# Altium footprint library PcbLib1.PcbLib: 13 footprints
Each footprint in its own frame and in the unit in brackets; x right, y up, seen from the top. Pads: shape width x height; smd on the part's side, far side on the other; paste and mask are expansions set on the pad; w line width, h text height; cw(c..) or ccw(c..) is an arc to the next point about the centre after c.
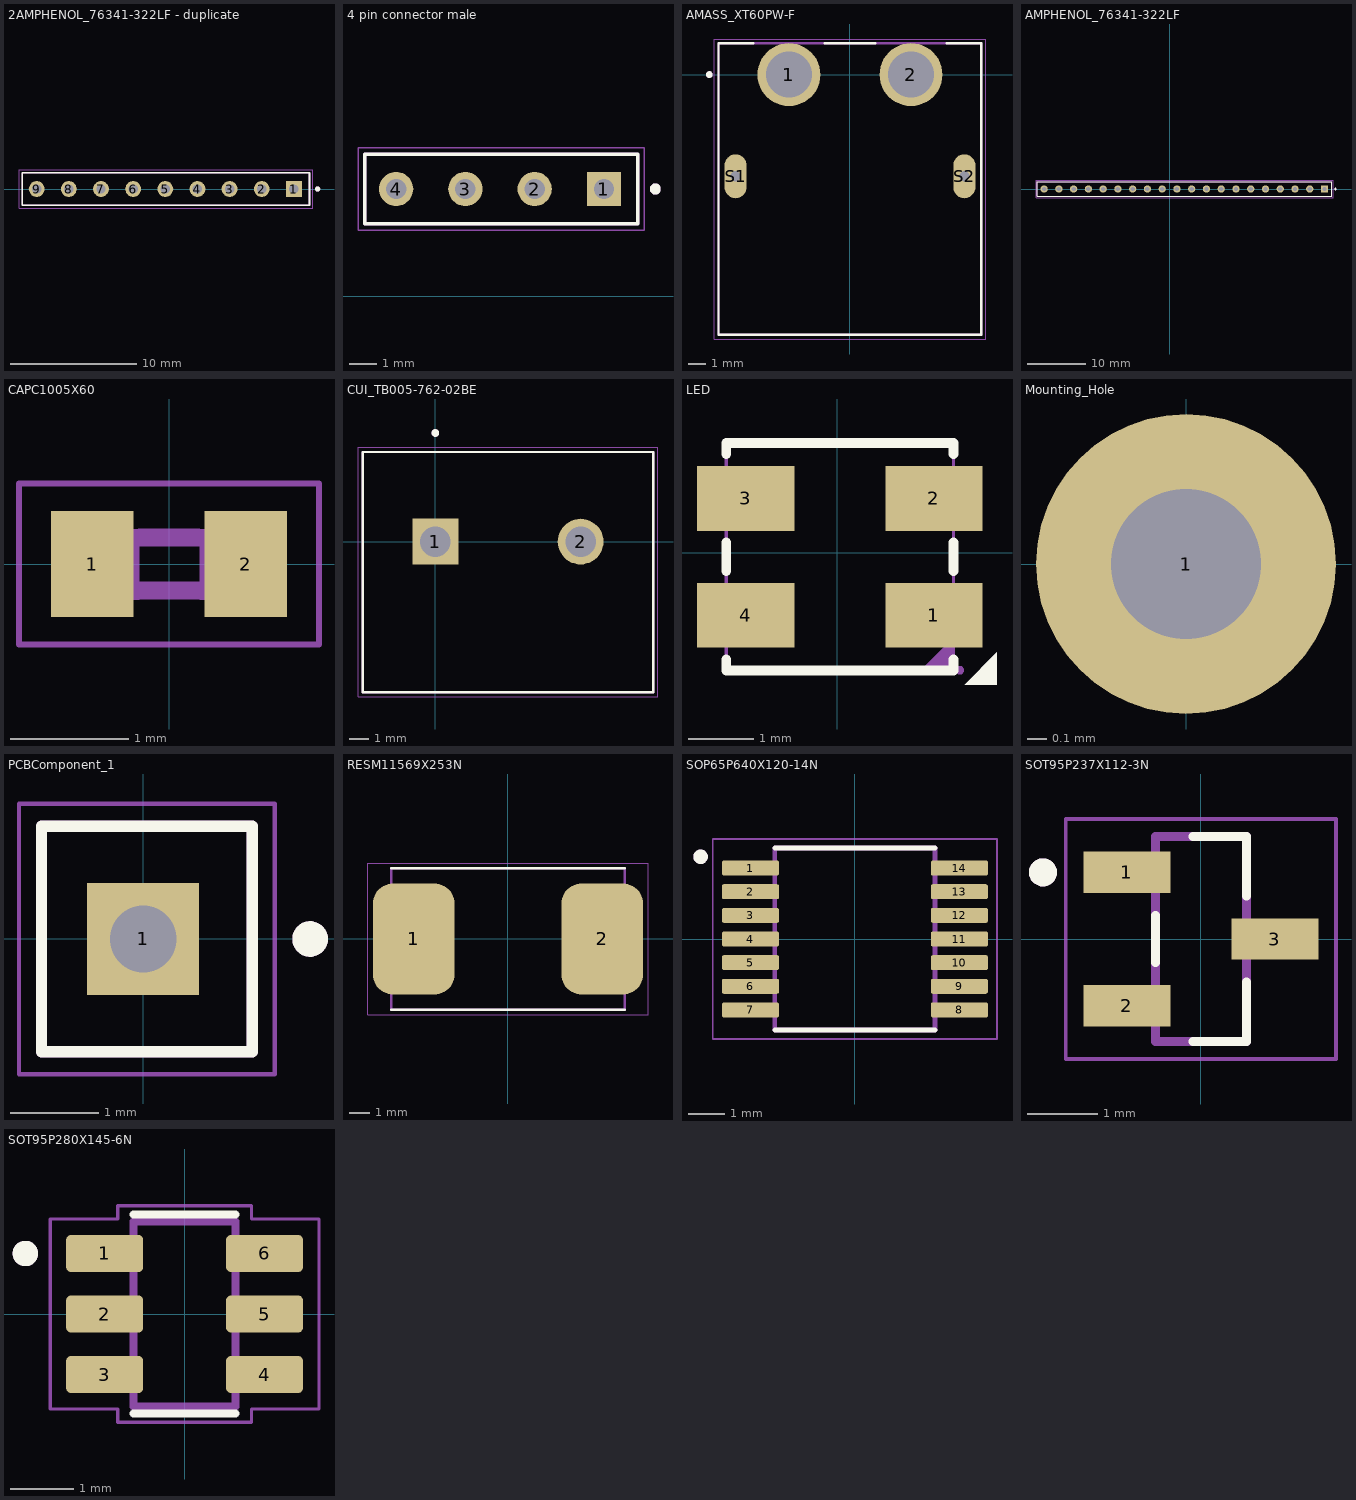
[diagram p0: the footprints below, top view; thin cyan lines are the x and y axes]

## 2AMPHENOL_76341-322LF - duplicate [mm]
pads (9):
  rect 1.258x1.258 / inner round 1.258 / far side rect 1.258x1.258 hole 0.75: 1(26.67,0)
  round 1.258 hole 0.75: 2(24.13,0) 3(21.59,0) 4(19.05,0) 5(16.51,0) 6(13.97,0) 7(11.43,0) 8(8.89,0) 9(6.35,0)
Top Overlay:
  circle w0.2: c28.55,0 r0.1
  lines w0.127: 5.207,-1.27 27.9,-1.27 27.9,1.27 5.207,1.27 5.207,-1.27
Mechanical 13:
  circle w0.2: c28.55,0 r0.1
  lines w0.127: 5.207,-1.27 27.9,-1.27 ; 5.207,-1.27 27.9,-1.27 ; 5.207,-1.27 5.207,1.27 27.9,1.27 27.9,-1.27
Mechanical 15:
  lines w0.05: 4.953,-1.52 4.953,1.52 28.15,1.52 28.15,-1.52 4.953,-1.52

## 4 pin connector male [mm]
pads (4):
  rect 1.258x1.258 / inner round 1.258 / far side rect 1.258x1.258 hole 0.75: 1(22.86,3.937)
  round 1.258 hole 0.75: 2(20.32,3.937) 3(17.78,3.937) 4(15.24,3.937)
Top Overlay:
  circle w0.2: c24.74,3.937 r0.1
  lines w0.127: 14.097,2.667 24.09,2.667 24.09,5.207 14.097,5.207 14.097,2.667
Mechanical 13:
  circle w0.2: c24.74,3.937 r0.1
  lines w0.127: 14.224,2.667 24.09,2.667 ; 24.09,2.667 24.09,5.207 14.097,5.207 14.097,2.667 24.09,2.667
Mechanical 15:
  lines w0.05: 13.843,2.417 24.34,2.417 24.34,5.457 13.843,5.457 13.843,2.417

## AMASS_XT60PW-F [mm]
height 8.4
pads (4):
  round 3.716 hole 2.7: 1(-3.6,0) 2(3.6,0)
  oval 1.3x2.6 hole 0.6 square: S1(-6.75,-6) S2(6.75,-6)
Top Overlay:
  circle w0.2: c-8.3,0 r0.1
  lines w0.127: -5.71,1.85 -7.75,1.85 -7.75,-15.35 7.75,-15.35 7.75,1.85 5.71,1.85 ; -1.49,1.85 1.49,1.85
Mechanical 13:
  circle w0.2: c-8.3,0 r0.1
  lines w0.127: -7.75,-15.35 7.75,-15.35 7.75,1.85 -7.75,1.85 -7.75,-15.35
Mechanical 15:
  lines w0.05: -8,-15.6 8,-15.6 8,2.1 -8,2.1 -8,-15.6
3D body "step_temp.STEP": height 8.4, standoff -2.55, extent -7.75,-15.35 7.75,1.85

## AMPHENOL_76341-322LF [mm]
pads (20):
  rect 1.258x1.258 / inner round 1.258 / far side rect 1.258x1.258 hole 0.75: 01(26.67,0)
  round 1.258 hole 0.75: 02(24.13,0) 03(21.59,0) 04(19.05,0) 05(16.51,0) 06(13.97,0) 07(11.43,0) 08(8.89,0) 09(6.35,0) 10(3.81,0) 11(1.27,0) 12(-1.27,0) 13(-3.81,0) 14(-6.35,0) 15(-8.89,0) 16(-11.43,0) 17(-13.97,0) 18(-16.51,0) 19(-19.05,0) 20(-21.59,0)
Top Overlay:
  circle w0.2: c28.55,0 r0.1
  lines w0.127: -22.733,-1.27 27.9,-1.27 27.9,1.27 -22.733,1.27 -22.733,-1.27
Mechanical 13:
  circle w0.2: c28.55,0 r0.1
  lines w0.127: -22.733,-1.27 27.9,-1.27 ; -22.733,-1.27 27.9,-1.27 ; -22.733,-1.27 -22.733,1.27 27.9,1.27 27.9,-1.27
Mechanical 15:
  lines w0.05: -22.987,-1.52 -22.987,1.52 28.15,1.52 28.15,-1.52 -22.987,-1.52

## CAPC1005X60 [mm]
pads (2):
  rect 0.7x0.9 smd: 1(-0.65,0) 2(0.65,0)
Mechanical 13:
  region: -0.254,-0.305 -0.555,-0.305 -0.555,0.295 -0.254,0.295
  region: 0.559,-0.305 0.259,-0.305 0.259,0.295 0.559,0.295
  lines w0.152: -0.245,-0.224 0.245,-0.224 ; -0.245,0.224 0.245,0.224
Mechanical 15:
  lines w0.051: -1.273,-0.683 1.273,-0.683 1.273,0.683 -1.273,0.683 -1.273,-0.683
3D body "step_temp.STEP": height 0.4, standoff 0, extent -0.5,-0.25 0.5,0.25

## CUI_TB005-762-02BE [mm]
pads (2):
  rect 2.4x2.4 / inner round 2.4 / far side rect 2.4x2.4 hole 1.6: 1(0,0)
  round 2.4 hole 1.6: 2(7.62,0)
Top Overlay:
  circle w0.2: c0,5.7 r0.1
  lines w0.127: -3.81,-7.9 11.43,-7.9 11.43,4.7 -3.81,4.7 -3.81,-7.9
Mechanical 13:
  circle w0.2: c0,5.7 r0.1
  lines w0.127: -3.81,-7.9 11.43,-7.9 11.43,4.7 -3.81,4.7 -3.81,-7.9
Mechanical 15:
  lines w0.05: -4.06,-8.15 -4.06,4.95 11.68,4.95 11.68,-8.15 -4.06,-8.15
3D body "step_temp.STEP": height 21.7, standoff -4.75, extent -4.318,-7.697 11.522,4.903

## LED [mm]
pads (4):
  rect 1.5x1 smd: 1(1.491,-0.96) 2(1.491,0.841) 3(-1.409,0.841) 4(-1.409,-0.96)
Top Overlay:
  region: 1.963,-2.032 2.463,-2.032 2.463,-1.532
  lines w0.152: -1.709,-1.64 -1.709,-1.809 1.791,-1.809 1.791,-1.64 ; -1.709,-0.279 -1.709,0.16 ; -1.709,1.521 -1.709,1.691 1.791,1.691 1.791,1.521 ; 1.791,-0.279 1.791,0.16
Mechanical 6:
  drawing of 21 lines, arcs and shapes, not listed
Mechanical 15:
  region: 1.951,-1.809 1.951,-1.834 1.916,-1.869 1.866,-1.869 1.831,-1.834 1.831,-1.809 1.831,-1.785 1.866,-1.749 1.916,-1.749 1.951,-1.785
  region: -0.909,0.441 -1.809,0.441 -1.809,1.241 -0.909,1.241
  region: -0.909,-1.36 -1.809,-1.36 -1.809,-0.56 -0.909,-0.56
  region: 1.891,0.441 0.991,0.441 0.991,1.241 1.891,1.241
  region: 1.891,-1.36 0.991,-1.36 0.991,-0.56 1.891,-0.56
  lines w0.051: -1.709,-1.809 -1.709,1.691 1.791,1.691 1.791,-1.809 -1.709,-1.809
3D body "SMD3535 RGB.stp": height 1, standoff 0, extent -1.723,-1.801 1.977,1.699

## Mounting_Hole [mil]
pads (1):
  round 60 hole 30: 1(0,0)

## PCBComponent_1 [mm]
pads (1):
  rect 1.258x1.258 / inner round 1.258 / far side rect 1.258x1.258 hole 0.75: 1(0,0)
Top Overlay:
  circle w0.2: c1.88,0 r0.1
  lines w0.127: -1.143,-1.27 1.23,-1.27 1.23,1.27 -1.143,1.27 -1.143,-1.27
Mechanical 13:
  circle w0.2: c1.88,0 r0.1
  lines w0.127: -1.143,-1.27 1.23,-1.27 ; -1.143,-1.27 1.23,-1.27 ; -1.143,-1.27 -1.143,1.27 1.23,1.27 1.23,-1.27
Mechanical 15:
  lines w0.05: -1.397,-1.52 -1.397,1.52 1.48,1.52 1.48,-1.52 -1.397,-1.52

## RESM11569X253N [mm]
pads (2):
  rrect50% 4.04x5.51 smd: 1(-4.665,0) 2(4.665,0)
Top Overlay:
  lines w0.127: -5.78,-3.49 5.78,-3.49 ; -5.78,3.49 5.78,3.49
Mechanical 13:
  lines w0.127: -5.78,-3.49 -5.78,3.49 5.78,3.49 5.78,-3.49 -5.78,-3.49
Mechanical 15:
  lines w0.05: -6.935,-3.74 -6.935,3.74 6.935,3.74 6.935,-3.74 -6.935,-3.74
3D body "WSR 2.STEP": height 2.42, standoff 0.01, extent -5.78,-3.556 5.78,3.424

## SOP65P640X120-14N [mm]
pads (14):
  rrect25% 1.57x0.41 smd: 1(-2.87,1.95) 2(-2.87,1.3) 3(-2.87,0.65) 4(-2.87,0) 5(-2.87,-0.65) 6(-2.87,-1.3) 7(-2.87,-1.95) 8(2.87,-1.95) 9(2.87,-1.3) 10(2.87,-0.65) 11(2.87,0) 12(2.87,0.65) 13(2.87,1.3) 14(2.87,1.95)
Top Overlay:
  circle w0.2: c-4.24,2.26 r0.1
  lines w0.127: -2.2,-2.5 2.2,-2.5 ; -2.2,2.5 2.2,2.5
Mechanical 13:
  circle w0.2: c-4.24,2.26 r0.1
  lines w0.127: -2.2,-2.5 -2.2,2.5 2.2,2.5 2.2,-2.5 -2.2,-2.5
Mechanical 15:
  lines w0.05: -3.905,-2.75 -3.905,2.75 3.905,2.75 3.905,-2.75 -3.905,-2.75
3D body "step_temp.STEP": height 1.2, standoff 0, extent -3.2,-2.5 3.2,2.5

## SOT95P237X112-3N [mm]
height 1.12
pads (3):
  rect 1.24x0.59 smd: 1(-1.055,0.95) 2(-1.055,-0.95) 3(1.055,0)
Top Overlay:
  circle w0.2: c-2.25,0.95 r0.1
  lines w0.127: -0.65,-0.335 -0.65,0.335 ; -0.115,-1.46 0.65,-1.46 0.65,-0.615 ; -0.115,1.46 0.65,1.46 0.65,0.615
Mechanical 13:
  circle w0.2: c-2.25,0.95 r0.1
  lines w0.127: -0.65,-1.46 0.65,-1.46 0.65,1.46 -0.65,1.46 -0.65,-1.46
Mechanical 15:
  lines w0.05: -1.925,-1.71 1.925,-1.71 1.925,1.71 -1.925,1.71 -1.925,-1.71
3D body "step_temp.STEP": height 1.12, standoff 0, extent -1.185,-1.46 1.185,1.46

## SOT95P280X145-6N [mm]
pads (6):
  rrect25% 1.21x0.58 smd: 1(-1.255,0.95) 2(-1.255,0) 3(-1.255,-0.95) 4(1.255,-0.95) 5(1.255,0) 6(1.255,0.95)
Top Overlay:
  circle w0.2: c-2.5,0.95 r0.1
  lines w0.127: -0.8,-1.56 0.8,-1.56 ; -0.8,1.56 0.8,1.56
Mechanical 13:
  circle w0.2: c-2.5,0.95 r0.1
  lines w0.127: -0.8,-1.45 -0.8,1.45 0.8,1.45 0.8,-1.45 -0.8,-1.45
Mechanical 15:
  lines w0.05: -2.11,-1.49 -2.11,1.49 -1.05,1.49 -1.05,1.7 1.05,1.7 1.05,1.49 2.11,1.49 2.11,-1.49 1.05,-1.49 1.05,-1.7 -1.05,-1.7 -1.05,-1.49 -2.11,-1.49
3D body "step_temp.STEP": height 1.45, standoff 0, extent -1.4,-1.45 1.4,1.45